# Altium footprint library Package_DFN_QFN.PcbLib: 735 footprints (part 1 of 46)
Each footprint in its own frame and in the unit in brackets; x right, y up, seen from the top. Pads: shape width x height; smd on the part's side, far side on the other; paste and mask are expansions set on the pad; w line width, h text height; cw(c..) or ccw(c..) is an arc to the next point about the centre after c.
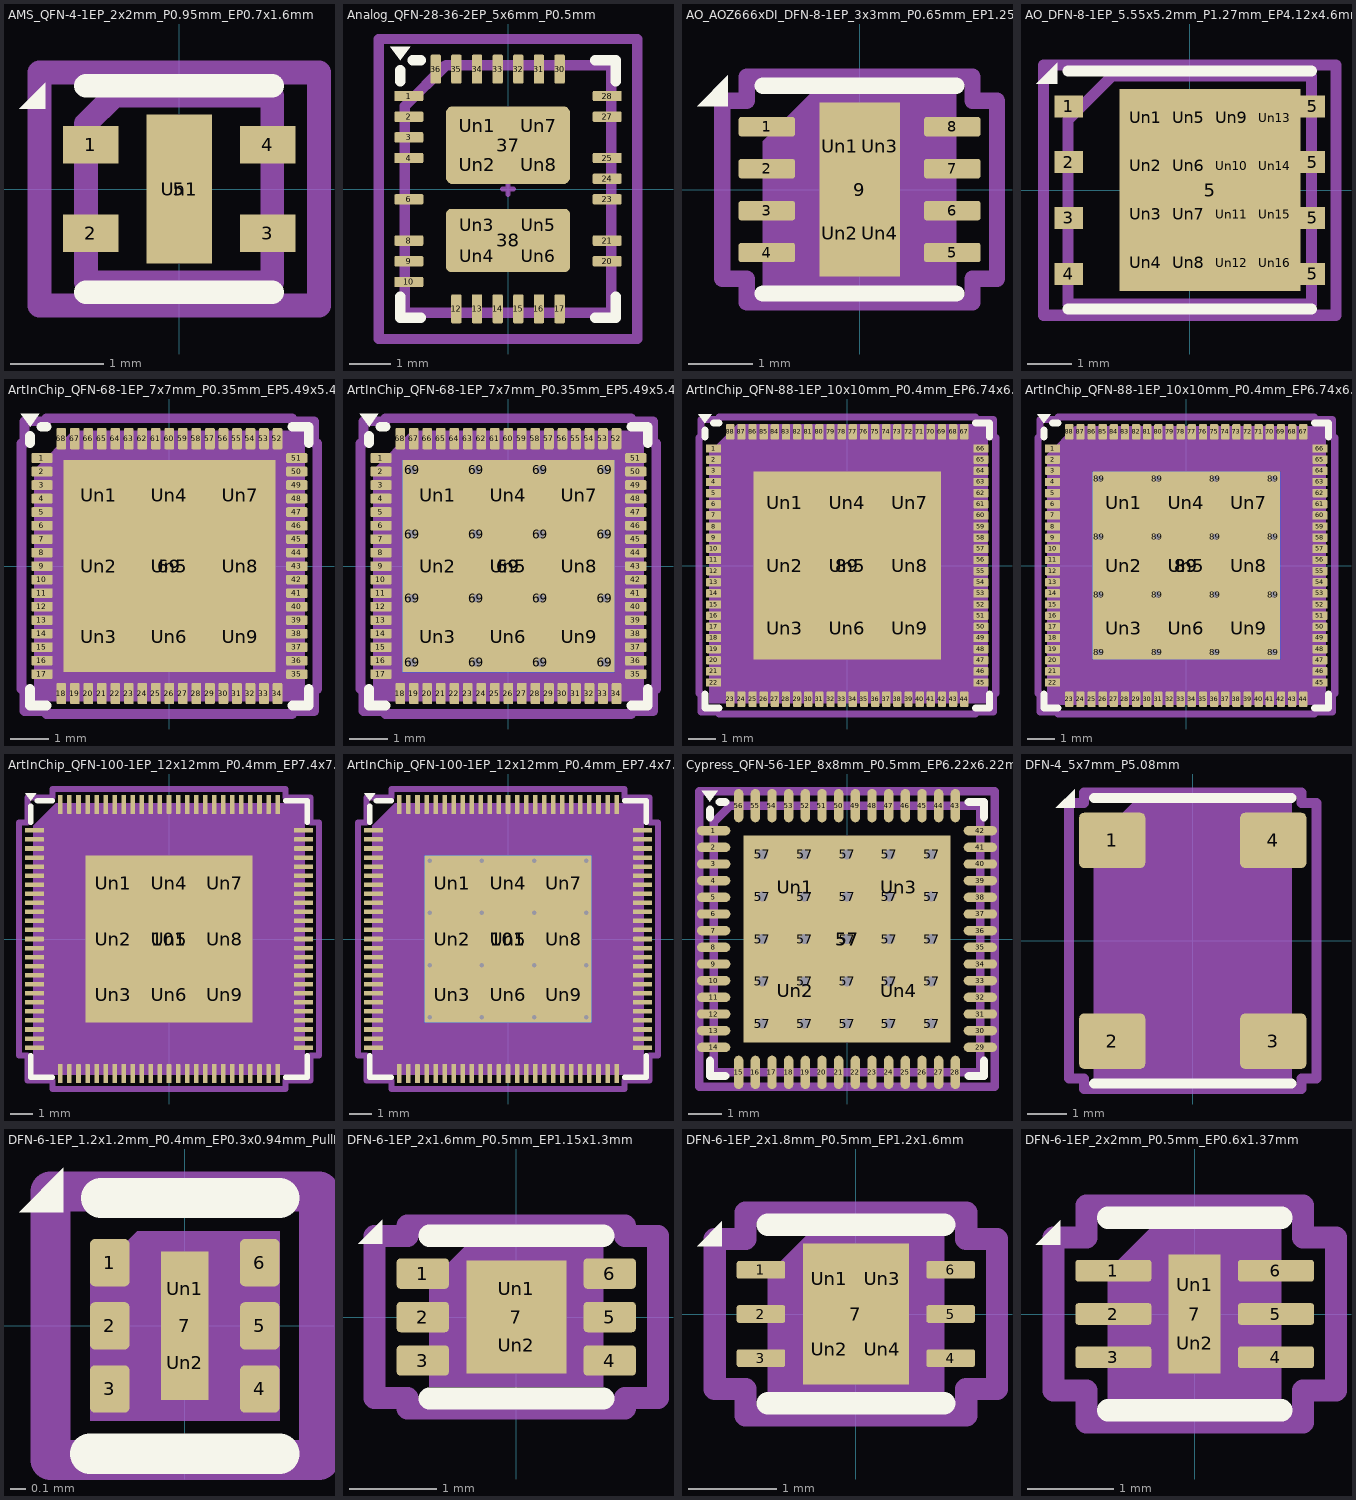
[diagram p0: the footprints below, top view; thin cyan lines are the x and y axes]

## AMS_QFN-4-1EP_2x2mm_P0.95mm_EP0.7x1.6mm [mm] "AMS_QFN-4-1EP_2x2mm_P0.95mm_EP0.7x1.6mm"
pads (6):
  rect 0.6x0.4 smd: 1(-0.95,0.475) 2(-0.95,-0.475) 3(0.95,-0.475) 4(0.95,0.475)
  rect 0.7x1.6 smd: 5(0,0)
  rect 0.35x0.8 on Top Paste: Un1(0,0)
F.SilkS:
  region: -1.44,0.86 -1.72,0.86 -1.44,1.14
  lines w0.254: -1,-1.11 1,-1.11 ; -1,1.11 1,1.11
Top Component Center:
  lines w0.127: -0.127,0 0.127,0 -0.127,0 ; 0,-0.127 0,0.127 0,-0.127
Top Assembly:
  lines w0.254: -1,-1 1,-1 1,1 -0.7,1 -1,0.7 -1,-1
Top Courtyard:
  lines w0.254: -1.5,-1.25 1.5,-1.25 1.5,1.25 -1.5,1.25 -1.5,-1.25
Top Designator:
  text ".Designator" at -2.251,-0.226 h1

## Analog_QFN-28-36-2EP_5x6mm_P0.5mm [mm] "Analog_QFN-28-36-2EP_5x6mm_P0.5mm"
pads (38):
  rrect25% 0.7x0.25 smd: 1(-2.4,2.25) 2(-2.4,1.75) 3(-2.4,1.25) 4(-2.4,0.75) 6(-2.4,-0.25) 8(-2.4,-1.25) 9(-2.4,-1.75) 10(-2.4,-2.25) 20(2.4,-1.75) 21(2.4,-1.25) 23(2.4,-0.25) 24(2.4,0.25) 25(2.4,0.75) 27(2.4,1.75) 28(2.4,2.25)
  rrect25% 0.25x0.7 smd: 12(-1.25,-2.9) 13(-0.75,-2.9) 14(-0.25,-2.9) 15(0.25,-2.9) 16(0.75,-2.9) 17(1.25,-2.9) 30(1.25,2.9) 31(0.75,2.9) 32(0.25,2.9) 33(-0.25,2.9) 34(-0.75,2.9) 35(-1.25,2.9) 36(-1.75,2.9)
  rrect16% 3x1.88 smd: 37(0,1.06)
  rrect16% 3x1.53 smd: 38(0,-1.245)
  rrect25% 1.21x0.76 on Top Paste: Un1(-0.75,1.53) Un2(-0.75,0.59) Un7(0.75,1.53) Un8(0.75,0.59)
  rrect25% 1.205x0.55 on Top Paste: Un3(-0.747,-0.875) Un4(-0.747,-1.625) Un5(0.747,-0.875) Un6(0.747,-1.625)
F.SilkS:
  region: -2.61,3.11 -2.85,3.44 -2.37,3.44
  lines w0.254: -2.61,-2.61 -2.61,-3.11 -2.11,-3.11 ; -2.61,2.61 -2.61,2.87 ; -2.31,3.11 -2.11,3.11 ; 2.11,-3.11 2.61,-3.11 2.61,-2.61 ; 2.11,3.11 2.61,3.11 2.61,2.61
Top Component Center:
  lines w0.127: -0.127,0 0.127,0 -0.127,0 ; 0,-0.127 0,0.127 0,-0.127
Top Assembly:
  lines w0.254: -2.5,-3 2.5,-3 2.5,3 -1.5,3 -2.5,2 -2.5,-3
Top Courtyard:
  lines w0.254: -3.13,-3.63 3.13,-3.63 3.13,3.63 -3.13,3.63 -3.13,-3.63
Top Designator:
  text ".Designator" at -3.43,-0.344 h1.52

## AO_AOZ666xDI_DFN-8-1EP_3x3mm_P0.65mm_EP1.25x2.7mm [mm] "AO_AOZ666xDI_DFN-8-1EP_3x3mm_P0.65mm_EP1.25x2.7mm"
pads (13):
  rrect25% 0.875x0.3 smd: 1(-1.438,0.975) 2(-1.438,0.325) 3(-1.438,-0.325) 4(-1.438,-0.975) 5(1.438,-0.975) 6(1.438,-0.325) 7(1.438,0.325) 8(1.438,0.975)
  rect 1.25x2.7 smd: 9(0,0)
  rrect25% 0.5x1.09 on Top Paste: Un1(-0.31,0.675) Un2(-0.31,-0.675) Un3(0.31,0.675) Un4(0.31,-0.675)
F.SilkS:
  region: -2.04,1.29 -2.52,1.29 -2.04,1.77
  lines w0.254: -1.5,-1.61 1.5,-1.61 ; -1.5,1.61 1.5,1.61
Top Component Center:
  lines w0.127: -0.127,0 0.127,0 -0.127,0 ; 0,-0.127 0,0.127 0,-0.127
Top Assembly:
  region: 1.5,-1.5 -1.5,-1.5 -1.5,0.75 -0.75,1.5 1.5,1.5
Top Courtyard:
  lines w0.254: -2.13,-1.38 -1.75,-1.38 -1.75,-1.75 1.75,-1.75 1.75,-1.38 2.13,-1.38 2.13,1.38 1.75,1.38 1.75,1.75 -1.75,1.75 -1.75,1.38 -2.13,1.38 -2.13,-1.38
Top Designator:
  text ".Designator" at -3.43,-0.344 h1.52

## AO_DFN-8-1EP_5.55x5.2mm_P1.27mm_EP4.12x4.6mm [mm] "AO_DFN-8-1EP_5.55x5.2mm_P1.27mm_EP4.12x4.6mm"
pads (25):
  rect 0.65x0.5 smd: 1(-2.75,1.905) 2(-2.75,0.635) 3(-2.75,-0.635) 4(-2.75,-1.905)
  rect 4.12x4.6 smd: 5(0.465,0)
  rect 0.55x0.5 smd: 5(2.8,-1.905) 5(2.8,-0.635) 5(2.8,0.635) 5(2.8,1.905)
  rect 0.78x0.9 on Top Paste: Un1(-1,1.65) Un2(-1,0.55) Un3(-1,-0.55) Un4(-1,-1.65) Un5(-0.02,1.65) Un6(-0.02,0.55) Un7(-0.02,-0.55) Un8(-0.02,-1.65) Un9(0.96,1.65) Un10(0.96,0.55) Un11(0.96,-0.55) Un12(0.96,-1.65) Un13(1.94,1.65) Un14(1.94,0.55) Un15(1.94,-0.55) Un16(1.94,-1.65)
F.SilkS:
  region: -3.02,2.42 -3.5,2.42 -3.02,2.9
  lines w0.254: -2.775,-2.71 2.775,-2.71 ; -2.775,2.71 2.775,2.71
Top Component Center:
  lines w0.127: -0.127,0 0.127,0 -0.127,0 ; 0,-0.127 0,0.127 0,-0.127
Top Assembly:
  lines w0.254: -2.775,-2.6 -2.775,1.6 -1.775,2.6 2.775,2.6 2.775,-2.6 -2.775,-2.6
Top Courtyard:
  lines w0.254: -3.33,-2.85 -3.33,2.85 3.33,2.85 3.33,-2.85 -3.33,-2.85
Top Designator:
  text ".Designator" at -3.43,-0.344 h1.52
3D body "AO_DFN-8-1EP_5.55x5.2mm_P1.27mm_EP4.12x4.6mm.step": height 0.96, standoff 0, extent -2.775,-2.588 2.775,2.588

## ArtInChip_QFN-68-1EP_7x7mm_P0.35mm_EP5.49x5.49mm [mm] "ArtInChip_QFN-68-1EP_7x7mm_P0.35mm_EP5.49x5.49mm"
pads (78):
  rrect25% 0.55x0.25 smd: 1(-3.3,2.8) 2(-3.3,2.45) 3(-3.3,2.1) 4(-3.3,1.75) 5(-3.3,1.4) 6(-3.3,1.05) 7(-3.3,0.7) 8(-3.3,0.35) 9(-3.3,0) 10(-3.3,-0.35) 11(-3.3,-0.7) 12(-3.3,-1.05) 13(-3.3,-1.4) 14(-3.3,-1.75) 15(-3.3,-2.1) 16(-3.3,-2.45) 17(-3.3,-2.8) 35(3.3,-2.8) 36(3.3,-2.45) 37(3.3,-2.1) 38(3.3,-1.75) 39(3.3,-1.4) 40(3.3,-1.05) 41(3.3,-0.7) 42(3.3,-0.35) 43(3.3,0) 44(3.3,0.35) 45(3.3,0.7) 46(3.3,1.05) 47(3.3,1.4) 48(3.3,1.75) 49(3.3,2.1) 50(3.3,2.45) 51(3.3,2.8)
  rrect25% 0.25x0.55 smd: 18(-2.8,-3.3) 19(-2.45,-3.3) 20(-2.1,-3.3) 21(-1.75,-3.3) 22(-1.4,-3.3) 23(-1.05,-3.3) 24(-0.7,-3.3) 25(-0.35,-3.3) 26(0,-3.3) 27(0.35,-3.3) 28(0.7,-3.3) 29(1.05,-3.3) 30(1.4,-3.3) 31(1.75,-3.3) 32(2.1,-3.3) 33(2.45,-3.3) 34(2.8,-3.3) 52(2.8,3.3) 53(2.45,3.3) 54(2.1,3.3) 55(1.75,3.3) 56(1.4,3.3) 57(1.05,3.3) 58(0.7,3.3) 59(0.35,3.3) 60(0,3.3) 61(-0.35,3.3) 62(-0.7,3.3) 63(-1.05,3.3) 64(-1.4,3.3) 65(-1.75,3.3) 66(-2.1,3.3) 67(-2.45,3.3) 68(-2.8,3.3)
  rect 5.49x5.49 smd: 69(0,0)
  rrect17% 1.48x1.48 on Top Paste: Un1(-1.83,1.83) Un2(-1.83,0) Un3(-1.83,-1.83) Un4(0,1.83) Un5(0,0) Un6(0,-1.83) Un7(1.83,1.83) Un8(1.83,0) Un9(1.83,-1.83)
F.SilkS:
  region: -3.61,3.61 -3.85,3.94 -3.37,3.94
  lines w0.254: -3.61,-3.185 -3.61,-3.61 -3.185,-3.61 ; -3.61,3.185 -3.61,3.37 ; -3.31,3.61 -3.185,3.61 ; 3.185,-3.61 3.61,-3.61 3.61,-3.185 ; 3.185,3.61 3.61,3.61 3.61,3.185
Top Component Center:
  lines w0.127: -0.127,0 0.127,0 -0.127,0 ; 0,-0.127 0,0.127 0,-0.127
Top Assembly:
  region: 3.5,-3.5 -3.5,-3.5 -3.5,2.5 -2.5,3.5 3.5,3.5
Top Courtyard:
  lines w0.254: -3.83,-3.18 -3.75,-3.18 -3.75,-3.75 -3.18,-3.75 -3.18,-3.83 3.18,-3.83 3.18,-3.75 3.75,-3.75 3.75,-3.18 3.83,-3.18 3.83,3.18 3.75,3.18 3.75,3.75 3.18,3.75 3.18,3.83 -3.18,3.83 -3.18,3.75 -3.75,3.75 -3.75,3.18 -3.83,3.18 -3.83,-3.18
Top Designator:
  text ".Designator" at -3.43,-0.344 h1.52
3D body "ArtInChip_QFN-68-1EP_7x7mm_P0.35mm_EP5.49x5.49mm.step": height 0.9, standoff 0, extent -3.5,-3.5 3.5,3.5

## ArtInChip_QFN-68-1EP_7x7mm_P0.35mm_EP5.49x5.49mm_ThermalVias [mm] "ArtInChip_QFN-68-1EP_7x7mm_P0.35mm_EP5.49x5.49mm_ThermalVias"
pads (95):
  rrect25% 0.55x0.25 smd: 1(-3.3,2.8) 2(-3.3,2.45) 3(-3.3,2.1) 4(-3.3,1.75) 5(-3.3,1.4) 6(-3.3,1.05) 7(-3.3,0.7) 8(-3.3,0.35) 9(-3.3,0) 10(-3.3,-0.35) 11(-3.3,-0.7) 12(-3.3,-1.05) 13(-3.3,-1.4) 14(-3.3,-1.75) 15(-3.3,-2.1) 16(-3.3,-2.45) 17(-3.3,-2.8) 35(3.3,-2.8) 36(3.3,-2.45) 37(3.3,-2.1) 38(3.3,-1.75) 39(3.3,-1.4) 40(3.3,-1.05) 41(3.3,-0.7) 42(3.3,-0.35) 43(3.3,0) 44(3.3,0.35) 45(3.3,0.7) 46(3.3,1.05) 47(3.3,1.4) 48(3.3,1.75) 49(3.3,2.1) 50(3.3,2.45) 51(3.3,2.8)
  rrect25% 0.25x0.55 smd: 18(-2.8,-3.3) 19(-2.45,-3.3) 20(-2.1,-3.3) 21(-1.75,-3.3) 22(-1.4,-3.3) 23(-1.05,-3.3) 24(-0.7,-3.3) 25(-0.35,-3.3) 26(0,-3.3) 27(0.35,-3.3) 28(0.7,-3.3) 29(1.05,-3.3) 30(1.4,-3.3) 31(1.75,-3.3) 32(2.1,-3.3) 33(2.45,-3.3) 34(2.8,-3.3) 52(2.8,3.3) 53(2.45,3.3) 54(2.1,3.3) 55(1.75,3.3) 56(1.4,3.3) 57(1.05,3.3) 58(0.7,3.3) 59(0.35,3.3) 60(0,3.3) 61(-0.35,3.3) 62(-0.7,3.3) 63(-1.05,3.3) 64(-1.4,3.3) 65(-1.75,3.3) 66(-2.1,3.3) 67(-2.45,3.3) 68(-2.8,3.3)
  round 0.5 hole 0.2: 69(-2.495,-2.495) 69(-2.495,-0.832) 69(-2.495,0.832) 69(-2.495,2.495) 69(-0.832,-2.495) 69(-0.832,-0.832) 69(-0.832,0.832) 69(-0.832,2.495) 69(0.832,-2.495) 69(0.832,-0.832) 69(0.832,0.832) 69(0.832,2.495) 69(2.495,-2.495) 69(2.495,-0.832) 69(2.495,0.832) 69(2.495,2.495)
  rect 5.49x5.49 smd: 69(0,0)
  rect 5.49x5.49 smd far side: 69(0,0)
  rrect18% 1.42x1.42 on Top Paste: Un1(-1.83,1.83) Un2(-1.83,0) Un3(-1.83,-1.83) Un4(0,1.83) Un5(0,0) Un6(0,-1.83) Un7(1.83,1.83) Un8(1.83,0) Un9(1.83,-1.83)
F.SilkS:
  region: -3.61,3.61 -3.85,3.94 -3.37,3.94
  lines w0.254: -3.61,-3.185 -3.61,-3.61 -3.185,-3.61 ; -3.61,3.185 -3.61,3.37 ; -3.31,3.61 -3.185,3.61 ; 3.185,-3.61 3.61,-3.61 3.61,-3.185 ; 3.185,3.61 3.61,3.61 3.61,3.185
Top Component Center:
  lines w0.127: -0.127,0 0.127,0 -0.127,0 ; 0,-0.127 0,0.127 0,-0.127
Top Assembly:
  region: 3.5,-3.5 -3.5,-3.5 -3.5,2.5 -2.5,3.5 3.5,3.5
Top Courtyard:
  lines w0.254: -3.83,-3.18 -3.83,3.18 -3.75,3.18 -3.75,3.75 -3.18,3.75 -3.18,3.83 3.18,3.83 3.18,3.75 3.75,3.75 3.75,3.18 3.83,3.18 3.83,-3.18 3.75,-3.18 3.75,-3.75 3.18,-3.75 3.18,-3.83 -3.18,-3.83 -3.18,-3.75 -3.75,-3.75 -3.75,-3.18 -3.83,-3.18
Top Designator:
  text ".Designator" at -3.43,-0.344 h1.52
3D body "ArtInChip_QFN-68-1EP_7x7mm_P0.35mm_EP5.49x5.49mm.step": height 0.9, standoff 0, extent -3.5,-3.5 3.5,3.5

## ArtInChip_QFN-88-1EP_10x10mm_P0.4mm_EP6.74x6.74mm [mm] "ArtInChip_QFN-88-1EP_10x10mm_P0.4mm_EP6.74x6.74mm"
pads (98):
  rrect25% 0.55x0.3 smd: 1(-4.8,4.2) 2(-4.8,3.8) 3(-4.8,3.4) 4(-4.8,3) 5(-4.8,2.6) 6(-4.8,2.2) 7(-4.8,1.8) 8(-4.8,1.4) 9(-4.8,1) 10(-4.8,0.6) 11(-4.8,0.2) 12(-4.8,-0.2) 13(-4.8,-0.6) 14(-4.8,-1) 15(-4.8,-1.4) 16(-4.8,-1.8) 17(-4.8,-2.2) 18(-4.8,-2.6) 19(-4.8,-3) 20(-4.8,-3.4) 21(-4.8,-3.8) 22(-4.8,-4.2) 45(4.8,-4.2) 46(4.8,-3.8) 47(4.8,-3.4) 48(4.8,-3) 49(4.8,-2.6) 50(4.8,-2.2) 51(4.8,-1.8) 52(4.8,-1.4) 53(4.8,-1) 54(4.8,-0.6) 55(4.8,-0.2) 56(4.8,0.2) 57(4.8,0.6) 58(4.8,1) 59(4.8,1.4) 60(4.8,1.8) 61(4.8,2.2) 62(4.8,2.6) 63(4.8,3) 64(4.8,3.4) 65(4.8,3.8) 66(4.8,4.2)
  rrect25% 0.3x0.55 smd: 23(-4.2,-4.8) 24(-3.8,-4.8) 25(-3.4,-4.8) 26(-3,-4.8) 27(-2.6,-4.8) 28(-2.2,-4.8) 29(-1.8,-4.8) 30(-1.4,-4.8) 31(-1,-4.8) 32(-0.6,-4.8) 33(-0.2,-4.8) 34(0.2,-4.8) 35(0.6,-4.8) 36(1,-4.8) 37(1.4,-4.8) 38(1.8,-4.8) 39(2.2,-4.8) 40(2.6,-4.8) 41(3,-4.8) 42(3.4,-4.8) 43(3.8,-4.8) 44(4.2,-4.8) 67(4.2,4.8) 68(3.8,4.8) 69(3.4,4.8) 70(3,4.8) 71(2.6,4.8) 72(2.2,4.8) 73(1.8,4.8) 74(1.4,4.8) 75(1,4.8) 76(0.6,4.8) 77(0.2,4.8) 78(-0.2,4.8) 79(-0.6,4.8) 80(-1,4.8) 81(-1.4,4.8) 82(-1.8,4.8) 83(-2.2,4.8) 84(-2.6,4.8) 85(-3,4.8) 86(-3.4,4.8) 87(-3.8,4.8) 88(-4.2,4.8)
  rect 6.74x6.74 smd: 89(0,0)
  rrect14% 1.81x1.81 on Top Paste: Un1(-2.25,2.25) Un2(-2.25,0) Un3(-2.25,-2.25) Un4(0,2.25) Un5(0,0) Un6(0,-2.25) Un7(2.25,2.25) Un8(2.25,0) Un9(2.25,-2.25)
F.SilkS:
  region: -5.11,5.11 -5.35,5.44 -4.87,5.44
  lines w0.254: -5.11,-4.61 -5.11,-5.11 -4.61,-5.11 ; -5.11,4.61 -5.11,4.87 ; -4.81,5.11 -4.61,5.11 ; 4.61,-5.11 5.11,-5.11 5.11,-4.61 ; 4.61,5.11 5.11,5.11 5.11,4.61
Top Component Center:
  lines w0.127: -0.127,0 0.127,0 -0.127,0 ; 0,-0.127 0,0.127 0,-0.127
Top Assembly:
  region: 5.047,-4.936 -4.953,-4.936 -4.953,4.064 -3.953,5.064 5.047,5.064
Top Courtyard:
  lines w0.254: -5.33,-4.6 -5.25,-4.6 -5.25,-5.25 -4.6,-5.25 -4.6,-5.33 4.6,-5.33 4.6,-5.25 5.25,-5.25 5.25,-4.6 5.33,-4.6 5.33,4.6 5.25,4.6 5.25,5.25 4.6,5.25 4.6,5.33 -4.6,5.33 -4.6,5.25 -5.25,5.25 -5.25,4.6 -5.33,4.6 -5.33,-4.6
Top Designator:
  text ".Designator" at -3.43,-0.344 h1.52
3D body "ArtInChip_QFN-88-1EP_10x10mm_P0.4mm_EP6.74x6.74mm.step": height 0.9, standoff 0, extent -5,-5 5,5

## ArtInChip_QFN-88-1EP_10x10mm_P0.4mm_EP6.74x6.74mm_ThermalVias [mm] "ArtInChip_QFN-88-1EP_10x10mm_P0.4mm_EP6.74x6.74mm_ThermalVias"
pads (115):
  rrect25% 0.55x0.3 smd: 1(-4.8,4.2) 2(-4.8,3.8) 3(-4.8,3.4) 4(-4.8,3) 5(-4.8,2.6) 6(-4.8,2.2) 7(-4.8,1.8) 8(-4.8,1.4) 9(-4.8,1) 10(-4.8,0.6) 11(-4.8,0.2) 12(-4.8,-0.2) 13(-4.8,-0.6) 14(-4.8,-1) 15(-4.8,-1.4) 16(-4.8,-1.8) 17(-4.8,-2.2) 18(-4.8,-2.6) 19(-4.8,-3) 20(-4.8,-3.4) 21(-4.8,-3.8) 22(-4.8,-4.2) 45(4.8,-4.2) 46(4.8,-3.8) 47(4.8,-3.4) 48(4.8,-3) 49(4.8,-2.6) 50(4.8,-2.2) 51(4.8,-1.8) 52(4.8,-1.4) 53(4.8,-1) 54(4.8,-0.6) 55(4.8,-0.2) 56(4.8,0.2) 57(4.8,0.6) 58(4.8,1) 59(4.8,1.4) 60(4.8,1.8) 61(4.8,2.2) 62(4.8,2.6) 63(4.8,3) 64(4.8,3.4) 65(4.8,3.8) 66(4.8,4.2)
  rrect25% 0.3x0.55 smd: 23(-4.2,-4.8) 24(-3.8,-4.8) 25(-3.4,-4.8) 26(-3,-4.8) 27(-2.6,-4.8) 28(-2.2,-4.8) 29(-1.8,-4.8) 30(-1.4,-4.8) 31(-1,-4.8) 32(-0.6,-4.8) 33(-0.2,-4.8) 34(0.2,-4.8) 35(0.6,-4.8) 36(1,-4.8) 37(1.4,-4.8) 38(1.8,-4.8) 39(2.2,-4.8) 40(2.6,-4.8) 41(3,-4.8) 42(3.4,-4.8) 43(3.8,-4.8) 44(4.2,-4.8) 67(4.2,4.8) 68(3.8,4.8) 69(3.4,4.8) 70(3,4.8) 71(2.6,4.8) 72(2.2,4.8) 73(1.8,4.8) 74(1.4,4.8) 75(1,4.8) 76(0.6,4.8) 77(0.2,4.8) 78(-0.2,4.8) 79(-0.6,4.8) 80(-1,4.8) 81(-1.4,4.8) 82(-1.8,4.8) 83(-2.2,4.8) 84(-2.6,4.8) 85(-3,4.8) 86(-3.4,4.8) 87(-3.8,4.8) 88(-4.2,4.8)
  round 0.5 hole 0.2: 89(-3.12,-3.12) 89(-3.12,-1.04) 89(-3.12,1.04) 89(-3.12,3.12) 89(-1.04,-3.12) 89(-1.04,-1.04) 89(-1.04,1.04) 89(-1.04,3.12) 89(1.04,-3.12) 89(1.04,-1.04) 89(1.04,1.04) 89(1.04,3.12) 89(3.12,-3.12) 89(3.12,-1.04) 89(3.12,1.04) 89(3.12,3.12)
  rect 6.74x6.74 smd: 89(0,0)
  rect 6.74x6.74 smd far side: 89(0,0)
  rrect14% 1.74x1.74 on Top Paste: Un1(-2.25,2.25) Un2(-2.25,0) Un3(-2.25,-2.25) Un4(0,2.25) Un5(0,0) Un6(0,-2.25) Un7(2.25,2.25) Un8(2.25,0) Un9(2.25,-2.25)
F.SilkS:
  region: -5.11,5.11 -5.35,5.44 -4.87,5.44
  lines w0.254: -5.11,-4.61 -5.11,-5.11 -4.61,-5.11 ; -5.11,4.61 -5.11,4.87 ; -4.81,5.11 -4.61,5.11 ; 4.61,-5.11 5.11,-5.11 5.11,-4.61 ; 4.61,5.11 5.11,5.11 5.11,4.61
Top Component Center:
  lines w0.127: -0.127,0 0.127,0 -0.127,0 ; 0,-0.127 0,0.127 0,-0.127
Top Assembly:
  region: 5,-5 -5,-5 -5,4 -4,5 5,5
Top Courtyard:
  lines w0.254: -5.33,-4.6 -5.25,-4.6 -5.25,-5.25 -4.6,-5.25 -4.6,-5.33 4.6,-5.33 4.6,-5.25 5.25,-5.25 5.25,-4.6 5.33,-4.6 5.33,4.6 5.25,4.6 5.25,5.25 4.6,5.25 4.6,5.33 -4.6,5.33 -4.6,5.25 -5.25,5.25 -5.25,4.6 -5.33,4.6 -5.33,-4.6
Top Designator:
  text ".Designator" at -3.43,-0.344 h1.52
3D body "ArtInChip_QFN-88-1EP_10x10mm_P0.4mm_EP6.74x6.74mm.step": height 0.9, standoff 0, extent -5,-5 5,5

## ArtInChip_QFN-100-1EP_12x12mm_P0.4mm_EP7.4x7.4mm [mm]
pads (110):
  rrect25% 0.85x0.2 smd: 1(-5.95,4.8) 2(-5.95,4.4) 3(-5.95,4) 4(-5.95,3.6) 5(-5.95,3.2) 6(-5.95,2.8) 7(-5.95,2.4) 8(-5.95,2) 9(-5.95,1.6) 10(-5.95,1.2) 11(-5.95,0.8) 12(-5.95,0.4) 13(-5.95,0) 14(-5.95,-0.4) 15(-5.95,-0.8) 16(-5.95,-1.2) 17(-5.95,-1.6) 18(-5.95,-2) 19(-5.95,-2.4) 20(-5.95,-2.8) 21(-5.95,-3.2) 22(-5.95,-3.6) 23(-5.95,-4) 24(-5.95,-4.4) 25(-5.95,-4.8) 51(5.95,-4.8) 52(5.95,-4.4) 53(5.95,-4) 54(5.95,-3.6) 55(5.95,-3.2) 56(5.95,-2.8) 57(5.95,-2.4) 58(5.95,-2) 59(5.95,-1.6) 60(5.95,-1.2) 61(5.95,-0.8) 62(5.95,-0.4) 63(5.95,0) 64(5.95,0.4) 65(5.95,0.8) 66(5.95,1.2) 67(5.95,1.6) 68(5.95,2) 69(5.95,2.4) 70(5.95,2.8) 71(5.95,3.2) 72(5.95,3.6) 73(5.95,4) 74(5.95,4.4) 75(5.95,4.8)
  rrect25% 0.2x0.85 smd: 26(-4.8,-5.95) 27(-4.4,-5.95) 28(-4,-5.95) 29(-3.6,-5.95) 30(-3.2,-5.95) 31(-2.8,-5.95) 32(-2.4,-5.95) 33(-2,-5.95) 34(-1.6,-5.95) 35(-1.2,-5.95) 36(-0.8,-5.95) 37(-0.4,-5.95) 38(0,-5.95) 39(0.4,-5.95) 40(0.8,-5.95) 41(1.2,-5.95) 42(1.6,-5.95) 43(2,-5.95) 44(2.4,-5.95) 45(2.8,-5.95) 46(3.2,-5.95) 47(3.6,-5.95) 48(4,-5.95) 49(4.4,-5.95) 50(4.8,-5.95) 76(4.8,5.95) 77(4.4,5.95) 78(4,5.95) 79(3.6,5.95) 80(3.2,5.95) 81(2.8,5.95) 82(2.4,5.95) 83(2,5.95) 84(1.6,5.95) 85(1.2,5.95) 86(0.8,5.95) 87(0.4,5.95) 88(0,5.95) 89(-0.4,5.95) 90(-0.8,5.95) 91(-1.2,5.95) 92(-1.6,5.95) 93(-2,5.95) 94(-2.4,5.95) 95(-2.8,5.95) 96(-3.2,5.95) 97(-3.6,5.95) 98(-4,5.95) 99(-4.4,5.95) 100(-4.8,5.95)
  rect 7.4x7.4 smd: 101(0,0)
  rrect13% 1.99x1.99 on Top Paste: Un1(-2.47,2.47) Un2(-2.47,0) Un3(-2.47,-2.47) Un4(0,2.47) Un5(0,0) Un6(0,-2.47) Un7(2.47,2.47) Un8(2.47,0) Un9(2.47,-2.47)
F.SilkS:
  region: -6.11,6.11 -6.35,6.44 -5.87,6.44
  lines w0.254: -6.11,-5.16 -6.11,-6.11 -5.16,-6.11 ; -6.11,5.16 -6.11,5.87 ; -5.81,6.11 -5.16,6.11 ; 5.16,-6.11 6.11,-6.11 6.11,-5.16 ; 5.16,6.11 6.11,6.11 6.11,5.16
Top Component Center:
  lines w0.127: -0.127,0 0.127,0 -0.127,0 ; 0,-0.127 0,0.127 0,-0.127
Top Assembly:
  region: 6,-6 -6,-6 -6,5 -5,6 6,6
Top Courtyard:
  lines w0.254: -6.63,-5.15 -6.25,-5.15 -6.25,-6.25 -5.15,-6.25 -5.15,-6.63 5.15,-6.63 5.15,-6.25 6.25,-6.25 6.25,-5.15 6.63,-5.15 6.63,5.15 6.25,5.15 6.25,6.25 5.15,6.25 5.15,6.63 -5.15,6.63 -5.15,6.25 -6.25,6.25 -6.25,5.15 -6.63,5.15 -6.63,-5.15
Top Designator:
  text ".Designator" at -3.43,-0.344 h1.52
3D body "ArtInChip_QFN-68-1EP_7x7mm_P0.35mm_EP5.49x5.49mm.step": height 0.9, standoff 0, extent -3.5,-3.5 3.5,3.5

## ArtInChip_QFN-100-1EP_12x12mm_P0.4mm_EP7.4x7.4mm_ThermalVias [mm] "ArtInChip_QFN-100-1EP_12x12mm_P0.4mm_EP7.4x7.4mm_ThermalVias"
pads (127):
  rrect25% 0.85x0.2 smd: 1(-5.95,4.8) 2(-5.95,4.4) 3(-5.95,4) 4(-5.95,3.6) 5(-5.95,3.2) 6(-5.95,2.8) 7(-5.95,2.4) 8(-5.95,2) 9(-5.95,1.6) 10(-5.95,1.2) 11(-5.95,0.8) 12(-5.95,0.4) 13(-5.95,0) 14(-5.95,-0.4) 15(-5.95,-0.8) 16(-5.95,-1.2) 17(-5.95,-1.6) 18(-5.95,-2) 19(-5.95,-2.4) 20(-5.95,-2.8) 21(-5.95,-3.2) 22(-5.95,-3.6) 23(-5.95,-4) 24(-5.95,-4.4) 25(-5.95,-4.8) 51(5.95,-4.8) 52(5.95,-4.4) 53(5.95,-4) 54(5.95,-3.6) 55(5.95,-3.2) 56(5.95,-2.8) 57(5.95,-2.4) 58(5.95,-2) 59(5.95,-1.6) 60(5.95,-1.2) 61(5.95,-0.8) 62(5.95,-0.4) 63(5.95,0) 64(5.95,0.4) 65(5.95,0.8) 66(5.95,1.2) 67(5.95,1.6) 68(5.95,2) 69(5.95,2.4) 70(5.95,2.8) 71(5.95,3.2) 72(5.95,3.6) 73(5.95,4) 74(5.95,4.4) 75(5.95,4.8)
  rrect25% 0.2x0.85 smd: 26(-4.8,-5.95) 27(-4.4,-5.95) 28(-4,-5.95) 29(-3.6,-5.95) 30(-3.2,-5.95) 31(-2.8,-5.95) 32(-2.4,-5.95) 33(-2,-5.95) 34(-1.6,-5.95) 35(-1.2,-5.95) 36(-0.8,-5.95) 37(-0.4,-5.95) 38(0,-5.95) 39(0.4,-5.95) 40(0.8,-5.95) 41(1.2,-5.95) 42(1.6,-5.95) 43(2,-5.95) 44(2.4,-5.95) 45(2.8,-5.95) 46(3.2,-5.95) 47(3.6,-5.95) 48(4,-5.95) 49(4.4,-5.95) 50(4.8,-5.95) 76(4.8,5.95) 77(4.4,5.95) 78(4,5.95) 79(3.6,5.95) 80(3.2,5.95) 81(2.8,5.95) 82(2.4,5.95) 83(2,5.95) 84(1.6,5.95) 85(1.2,5.95) 86(0.8,5.95) 87(0.4,5.95) 88(0,5.95) 89(-0.4,5.95) 90(-0.8,5.95) 91(-1.2,5.95) 92(-1.6,5.95) 93(-2,5.95) 94(-2.4,5.95) 95(-2.8,5.95) 96(-3.2,5.95) 97(-3.6,5.95) 98(-4,5.95) 99(-4.4,5.95) 100(-4.8,5.95)
  round 0.5 hole 0.2: 101(-3.45,-3.45) 101(-3.45,-1.15) 101(-3.45,1.15) 101(-3.45,3.45) 101(-1.15,-3.45) 101(-1.15,-1.15) 101(-1.15,1.15) 101(-1.15,3.45) 101(1.15,-3.45) 101(1.15,-1.15) 101(1.15,1.15) 101(1.15,3.45) 101(3.45,-3.45) 101(3.45,-1.15) 101(3.45,1.15) 101(3.45,3.45)
  rect 7.4x7.4 smd: 101(0,0)
  rect 7.4x7.4 smd far side: 101(0,0)
  rrect13% 1.91x1.91 on Top Paste: Un1(-2.47,2.47) Un2(-2.47,0) Un3(-2.47,-2.47) Un4(0,2.47) Un5(0,0) Un6(0,-2.47) Un7(2.47,2.47) Un8(2.47,0) Un9(2.47,-2.47)
F.SilkS:
  region: -6.11,6.11 -6.35,6.44 -5.87,6.44
  lines w0.254: -6.11,-5.16 -6.11,-6.11 -5.16,-6.11 ; -6.11,5.16 -6.11,5.87 ; -5.81,6.11 -5.16,6.11 ; 5.16,-6.11 6.11,-6.11 6.11,-5.16 ; 5.16,6.11 6.11,6.11 6.11,5.16
Top Component Center:
  lines w0.127: -0.127,0 0.127,0 -0.127,0 ; 0,-0.127 0,0.127 0,-0.127
Top Assembly:
  region: 6,-6 -6,-6 -6,5 -5,6 6,6
Top Courtyard:
  lines w0.254: -6.63,-5.15 -6.25,-5.15 -6.25,-6.25 -5.15,-6.25 -5.15,-6.63 5.15,-6.63 5.15,-6.25 6.25,-6.25 6.25,-5.15 6.63,-5.15 6.63,5.15 6.25,5.15 6.25,6.25 5.15,6.25 5.15,6.63 -5.15,6.63 -5.15,6.25 -6.25,6.25 -6.25,5.15 -6.63,5.15 -6.63,-5.15
Top Designator:
  text ".Designator" at -3.43,-0.344 h1.52
3D body "ArtInChip_QFN-100-1EP_12x12mm_P0.4mm_EP7.4x7.4mm.step": height 0.85, standoff 0, extent -6,-6 6,6

## Cypress_QFN-56-1EP_8x8mm_P0.5mm_EP6.22x6.22mm_ThermalVias [mm] "Cypress_QFN-56-1EP_8x8mm_P0.5mm_EP6.22x6.22mm_ThermalVias"
pads (87):
  rrect100% 1x0.28 smd: 1(-4,3.25) 2(-4,2.75) 3(-4,2.25) 4(-4,1.75) 5(-4,1.25) 6(-4,0.75) 7(-4,0.25) 8(-4,-0.25) 9(-4,-0.75) 10(-4,-1.25) 11(-4,-1.75) 12(-4,-2.25) 13(-4,-2.75) 14(-4,-3.25) 29(4,-3.25) 30(4,-2.75) 31(4,-2.25) 32(4,-1.75) 33(4,-1.25) 34(4,-0.75) 35(4,-0.25) 36(4,0.25) 37(4,0.75) 38(4,1.25) 39(4,1.75) 40(4,2.25) 41(4,2.75) 42(4,3.25)
  rrect100% 0.28x1 smd: 15(-3.25,-4) 16(-2.75,-4) 17(-2.25,-4) 18(-1.75,-4) 19(-1.25,-4) 20(-0.75,-4) 21(-0.25,-4) 22(0.25,-4) 23(0.75,-4) 24(1.25,-4) 25(1.75,-4) 26(2.25,-4) 27(2.75,-4) 28(3.25,-4) 43(3.25,4) 44(2.75,4) 45(2.25,4) 46(1.75,4) 47(1.25,4) 48(0.75,4) 49(0.25,4) 50(-0.25,4) 51(-0.75,4) 52(-1.25,4) 53(-1.75,4) 54(-2.25,4) 55(-2.75,4) 56(-3.25,4)
  round 0.6 hole 0.3: 57(-2.54,-2.54) 57(-2.54,-1.27) 57(-2.54,0) 57(-2.54,1.27) 57(-2.54,2.54) 57(-1.27,-2.54) 57(-1.27,-1.27) 57(-1.27,0) 57(-1.27,1.27) 57(-1.27,2.54) 57(0,-2.54) 57(0,-1.27) 57(0,0) 57(0,1.27) 57(0,2.54) 57(1.27,-2.54) 57(1.27,-1.27) 57(1.27,0) 57(1.27,1.27) 57(1.27,2.54) 57(2.54,-2.54) 57(2.54,-1.27) 57(2.54,0) 57(2.54,1.27) 57(2.54,2.54)
  rect 6.22x6.22 smd: 57(0,0)
  rect 6.1x6.1 smd far side: 57(0,0)
  rect 2.6x2.6 on Top Paste: Un1(-1.555,1.555) Un2(-1.555,-1.555) Un3(1.555,1.555) Un4(1.555,-1.555)
F.SilkS:
  region: -4.12,4.12 -4.36,4.45 -3.88,4.45
  lines w0.254: -4.11,-3.65 -4.11,-4.11 -3.65,-4.11 ; -4.11,3.65 -4.11,3.88 ; -3.82,4.11 -3.65,4.11 ; 3.65,-4.11 4.11,-4.11 4.11,-3.65 ; 3.65,4.11 4.11,4.11 4.11,3.65
F.Mask:
  circle w0.254: c-2.54,2.54 r0.3
  circle w0.254: c-2.54,1.27 r0.3
  circle w0.254: c-2.54,0 r0.3
  circle w0.254: c-2.54,-1.27 r0.3
  circle w0.254: c-2.54,-2.54 r0.3
  circle w0.254: c-1.27,2.54 r0.3
  circle w0.254: c-1.27,1.27 r0.3
  circle w0.254: c-1.27,0 r0.3
  circle w0.254: c-1.27,-1.27 r0.3
  circle w0.254: c-1.27,-2.54 r0.3
  circle w0.254: c0,2.54 r0.3
  circle w0.254: c0,1.27 r0.3
  circle w0.254: c0,0 r0.3
  circle w0.254: c0,-1.27 r0.3
  circle w0.254: c0,-2.54 r0.3
  circle w0.254: c1.27,2.54 r0.3
  circle w0.254: c1.27,1.27 r0.3
  circle w0.254: c1.27,0 r0.3
  circle w0.254: c1.27,-1.27 r0.3
  circle w0.254: c1.27,-2.54 r0.3
  circle w0.254: c2.54,2.54 r0.3
  circle w0.254: c2.54,1.27 r0.3
  circle w0.254: c2.54,0 r0.3
  circle w0.254: c2.54,-1.27 r0.3
  circle w0.254: c2.54,-2.54 r0.3
  region: -2.75,-3.11 -3.11,-3.11 -3.11,3.11 -2.75,3.11
  region: 3.11,-3.11 -3.11,-3.11 -3.11,-2.75 3.11,-2.75
  region: 3.11,2.75 -3.11,2.75 -3.11,3.11 3.11,3.11
  region: 3.11,-3.11 2.75,-3.11 2.75,3.11 3.11,3.11
  lines w0.254: -2.54,-1.905 2.54,-1.905 ; -2.54,-0.635 2.54,-0.635 ; -2.54,0.635 2.54,0.635 ; -2.54,1.905 2.54,1.905 ; -1.905,-2.54 -1.905,2.54 ; -0.635,-2.54 -0.635,2.54 ; 0.635,-2.54 0.635,2.54 ; 1.905,-2.54 1.905,2.54
Top Component Center:
  lines w0.127: -0.127,0 0.127,0 -0.127,0 ; 0,-0.127 0,0.127 0,-0.127
Top Assembly:
  lines w0.254: -4,-4 -4,3.5 -3.5,4 4,4 4,-4 -4,-4
Top Courtyard:
  lines w0.254: -4.43,-4.43 -4.43,4.43 4.43,4.43 4.43,-4.43 -4.43,-4.43
Top Designator:
  text ".Designator" at -3.43,-0.344 h1.52

## DFN-4_5x7mm_P5.08mm [mm] "DFN-4_5x7mm_P5.08mm"
pads (4):
  rrect18% 1.675x1.4 smd: 1(-2.037,2.54) 2(-2.037,-2.54) 3(2.037,-2.54) 4(2.037,2.54)
F.SilkS:
  region: -2.99,3.36 -3.47,3.36 -2.99,3.84
  lines w0.254: -2.5,-3.61 2.5,-3.61 ; -2.5,3.61 2.5,3.61
Top Component Center:
  lines w0.127: -0.127,0 0.127,0 -0.127,0 ; 0,-0.127 0,0.127 0,-0.127
Top Assembly:
  region: 2.5,-3.5 -2.5,-3.5 -2.5,2.5 -1.5,3.5 2.5,3.5
Top Courtyard:
  lines w0.254: -3.13,-3.49 -3.13,3.49 -2.75,3.49 -2.75,3.75 2.75,3.75 2.75,3.49 3.13,3.49 3.13,-3.49 2.75,-3.49 2.75,-3.75 -2.75,-3.75 -2.75,-3.49 -3.13,-3.49
Top Designator:
  text ".Designator" at -3.43,-0.344 h1.52

## DFN-6-1EP_1.2x1.2mm_P0.4mm_EP0.3x0.94mm_PullBack [mm] "DFN-6-1EP_1.2x1.2mm_P0.4mm_EP0.3x0.94mm_PullBack"
pads (9):
  rrect25% 0.25x0.3 smd: 1(-0.475,0.4) 2(-0.475,0) 3(-0.475,-0.4) 4(0.475,-0.4) 5(0.475,0) 6(0.475,0.4)
  rect 0.3x0.94 smd: 7(0,0)
  rrect25% 0.24x0.38 on Top Paste: Un1(0,0.235) Un2(0,-0.235)
F.SilkS:
  region: -0.77,0.72 -1.05,0.72 -0.77,1
  lines w0.254: -0.6,-0.81 0.6,-0.81 ; -0.53,0.81 0.6,0.81
Top Component Center:
  lines w0.127: -0.127,0 0.127,0 -0.127,0 ; 0,-0.127 0,0.127 0,-0.127
Top Assembly:
  region: 0.6,-0.6 -0.6,-0.6 -0.6,0.3 -0.3,0.6 0.6,0.6
Top Courtyard:
  lines w0.254: -0.85,-0.85 -0.85,0.85 0.85,0.85 0.85,-0.85 -0.85,-0.85
Top Designator:
  text ".Designator" at -1.575,-0.158 h0.7
3D body "DFN-6-1EP_1.2x1.2mm_P0.4mm_EP0.3x0.94mm.step": height 0.4, standoff 0, extent -0.6,-0.59 0.6,0.59

## DFN-6-1EP_2x1.6mm_P0.5mm_EP1.15x1.3mm [mm] "DFN-6-1EP_2x1.6mm_P0.5mm_EP1.15x1.3mm"
pads (9):
  rrect25% 0.6x0.35 smd: 1(-1.075,0.5) 2(-1.075,0) 3(-1.075,-0.5) 4(1.075,-0.5) 5(1.075,0) 6(1.075,0.5)
  rect 1.15x1.3 smd: 7(0,0)
  rrect25% 0.93x0.52 on Top Paste: Un1(0,0.325) Un2(0,-0.325)
F.SilkS:
  region: -1.54,0.84 -1.82,0.84 -1.54,1.12
  lines w0.254: -1,-0.935 1,-0.935 ; -1,0.935 1,0.935
Top Component Center:
  lines w0.127: -0.127,0 0.127,0 -0.127,0 ; 0,-0.127 0,0.127 0,-0.127
Top Assembly:
  region: 1,-0.8 -1,-0.8 -1,0.4 -0.6,0.8 1,0.8
Top Courtyard:
  lines w0.254: -1.63,-0.93 -1.63,0.93 -1.25,0.93 -1.25,1.05 1.25,1.05 1.25,0.93 1.63,0.93 1.63,-0.93 1.25,-0.93 1.25,-1.05 -1.25,-1.05 -1.25,-0.93 -1.63,-0.93
Top Designator:
  text ".Designator" at -2.251,-0.226 h1

## DFN-6-1EP_2x1.8mm_P0.5mm_EP1.2x1.6mm [mm] "DFN-6-1EP_2x1.8mm_P0.5mm_EP1.2x1.6mm"
pads (11):
  rrect25% 0.55x0.2 smd: 1(-1.075,0.5) 2(-1.075,0) 3(-1.075,-0.5) 4(1.075,-0.5) 5(1.075,0) 6(1.075,0.5)
  rect 1.2x1.6 smd: 7(0,0)
  rrect25% 0.48x0.64 on Top Paste: Un1(-0.3,0.4) Un2(-0.3,-0.4) Un3(0.3,0.4) Un4(0.3,-0.4)
F.SilkS:
  region: -1.52,0.77 -1.8,0.77 -1.52,1.05
  lines w0.254: -1,-1.01 1,-1.01 ; -1,1.01 1,1.01
Top Component Center:
  lines w0.127: -0.127,0 0.127,0 -0.127,0 ; 0,-0.127 0,0.127 0,-0.127
Top Assembly:
  region: 1,-0.9 -1,-0.9 -1,0.45 -0.55,0.9 1,0.9
Top Courtyard:
  lines w0.254: -1.6,-0.85 -1.25,-0.85 -1.25,-1.15 1.25,-1.15 1.25,-0.85 1.6,-0.85 1.6,0.85 1.25,0.85 1.25,1.15 -1.25,1.15 -1.25,0.85 -1.6,0.85 -1.6,-0.85
Top Designator:
  text ".Designator" at -2.251,-0.226 h1

## DFN-6-1EP_2x2mm_P0.5mm_EP0.6x1.37mm [mm] "DFN-6-1EP_2x2mm_P0.5mm_EP0.6x1.37mm"
pads (9):
  rrect25% 0.875x0.25 smd: 1(-0.937,0.5) 2(-0.937,0) 3(-0.937,-0.5) 4(0.937,-0.5) 5(0.937,0) 6(0.937,0.5)
  rect 0.6x1.37 smd: 7(0,0)
  rrect25% 0.48x0.55 on Top Paste: Un1(0,0.34) Un2(0,-0.34)
F.SilkS:
  region: -1.55,0.8 -1.83,0.8 -1.55,1.08
  lines w0.254: -1,-1.11 1,-1.11 ; -1,1.11 1,1.11
Top Component Center:
  lines w0.127: -0.127,0 0.127,0 -0.127,0 ; 0,-0.127 0,0.127 0,-0.127
Top Assembly:
  region: 1,-1 -1,-1 -1,0.5 -0.5,1 1,1
Top Courtyard:
  lines w0.254: -1.63,-0.88 -1.63,0.88 -1.25,0.88 -1.25,1.25 1.25,1.25 1.25,0.88 1.63,0.88 1.63,-0.88 1.25,-0.88 1.25,-1.25 -1.25,-1.25 -1.25,-0.88 -1.63,-0.88
Top Designator:
  text ".Designator" at -2.251,-0.226 h1
3D body "DFN-6-1EP_2x2mm_P0.5mm_EP0.61x1.42mm.step": height 0.77, standoff 0, extent -1,-0.99 1,0.99